# Altium footprint library REY5-19.0X15.0X15.0MM.PcbLib: 1 footprints
Each footprint in its own frame and in the unit in brackets; x right, y up, seen from the top. Pads: shape width x height; smd on the part's side, far side on the other; paste and mask are expansions set on the pad; w line width, h text height; cw(c..) or ccw(c..) is an arc to the next point about the centre after c.
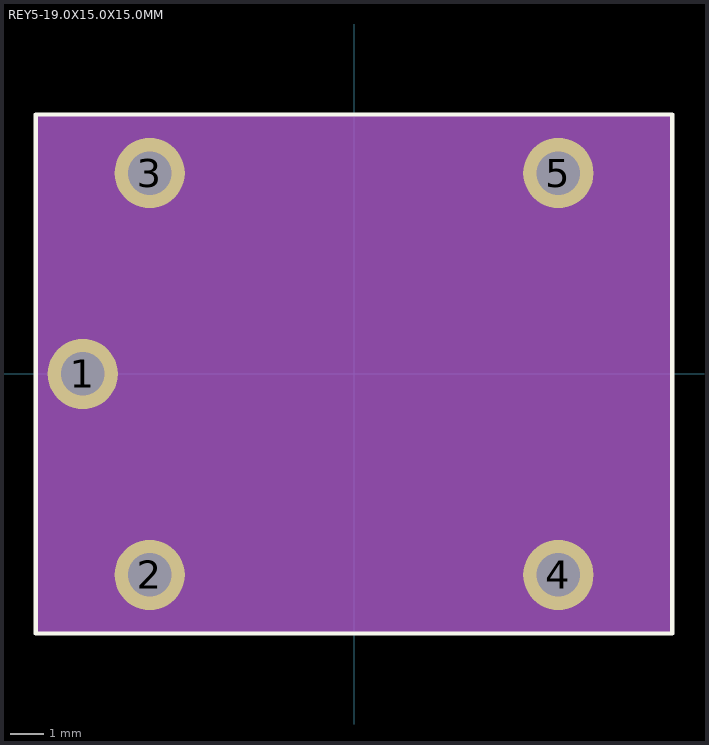
[diagram p0: the footprint, top view; thin cyan lines are the x and y axes]

## REY5-19.0X15.0X15.0MM [mm]
pads (5):
  round 2.1 hole 1.3: 1(-8.1,0) 2(-6.1,-6) 3(-6.1,6) 4(6.1,-6) 5(6.1,6)
Top Overlay:
  lines w0.127: -9.5,-7.75 -9.5,7.75 9.5,7.75 9.5,-7.75 -9.5,-7.75
Courtyard Top:
  region: 9.5,-7.751 -9.502,-7.751 -9.502,7.75 9.5,7.75
3D body "step_temp.STEP": height 15.8, standoff -4, extent -9.5,-7.75 9.5,7.75